# Altium integrated library VNL5050S5-E.IntLib: 1 symbol
Pins are listed as number, name and electrical type; pins without a type are passive.

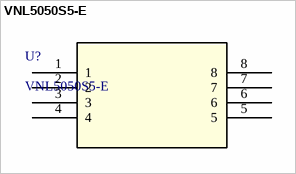
[diagram p0: symbol VNL5050S5-E]

## VNL5050S5-E
designator U?
OMNIFET III fully protected low-side driver; Manufacturer_Name: STMicroelectronics; Copyright: Copyright (C) 2026 Ultra Librarian. All rights reserved.; Manufacturer_Part_Number: VNL5050S5-E; Datasheet: https://www.st.com/resource/en/datasheet/vnl5050n3-e.pdf; RefDes: RefDes; Type: Type
footprint SO-8_STM
pins: 1, 2, 3, 4, 5, 6, 7, 8